# Altium schematic symbol library TSC2007IPWR.SchLib: 1 symbol
Pins are listed as number, name and electrical type; pins without a type are passive.

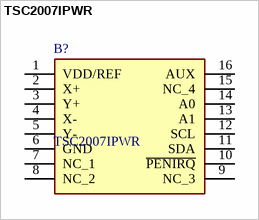
[diagram p0: symbol TSC2007IPWR]

## TSC2007IPWR
designator B?
TEXAS INSTRUMENTS - TSC2007IPWR - TOUCH SCREEN CONTROLLER, 12BIT, TSSOP-16; Geometry.Height: 1.2mm; Manufacturer_Name: Texas Instruments; Manufacturer_Part_Number: TSC2007IPWR; Mouser Part Number: 595-TSC2007IPWR; Mouser Price/Stock: https://www.mouser.co.uk/ProductDetail/Texas-Instruments/TSC2007IPWR?qs=6RlL8P85hLFwvOkF4fJ0jA%3D%3D; Arrow Part Number: TSC2007IPWR; Arrow Price/Stock: https://www.arrow.com/en/products/tsc2007ipwr/texas-instruments?region=nac; Datasheet Link: http://www.ti.com/lit/ds/symlink/tsc2007.pdf
footprint SOP65P640X120-16N
pins: 1 VDD/REF, 2 X+, 3 Y+, 4 X-, 5 Y-, 6 GND, 7 NC_1, 8 NC_2, 9 NC_3, 10 ~{PENIRQ}, 11 SDA, 12 SCL, 13 A1, 14 A0, 15 NC_4, 16 AUX